# Altium schematic symbol library Controlador_BombaDeAgua(analogico).SCHLIB: 9 symbols
Pins are listed as number, name and electrical type; pins without a type are passive.

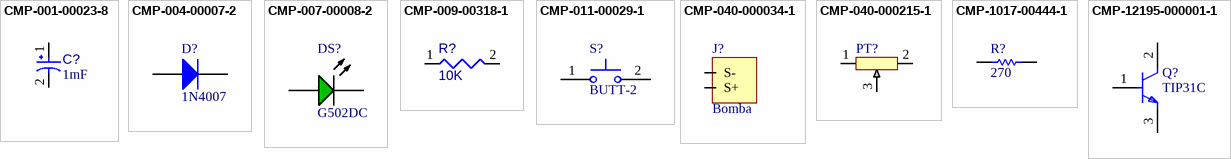
[diagram p0: symbols CMP-001-00023-8 to CMP-12195-000001-1]

## CMP-001-00023-8
designator C?, comment value 1mF  (hidden comment: ECA1EM102)
Aluminum Electrolytic Capacitor, 1000 uF, +/- 20%, 25 V, -40 to 85 degC, 2-Pin THD, RoHS, Bulk; Manufacturer: Panasonic; Manufacturer: Panasonic / Panasonic ECG; Manufacturer Part Number: ECA-1EM102; Ripple Current: 850mA; Voltage Rating: 25V; Lead Pitch: 5mm; Datasheet URL: https://industrial.panasonic.com/cdbs/www-data/pdf/RDF0000/ABA0000C1218.pdf; Packaging: Bulk; Package Reference: CAPPR65-500-2000X1000X2200; Package Description: 2-Pin Radial Lead, Dia 10 mm, Height 22 mm; Diameter: 10mm; Min Operating Temperature: -40°C; Datasheet Version: Rev. 05, 10/2016; RoHS Compliant: True; Capacitor Type: Electrolytic; Tolerance: 20%; Mounting Technology: TH; Manufacturer URL: http://www.panasonic.com/; Max Operating Temperature: 85°C; Package Quantity: 200; Case/Package: Radial; Component Type: Capacitors
footprint CAPPR65-500-2000X1000X2200 (THD, 2-Leads, Dia 10mm, Pin Spacing 5mm)
pins: 1, 2

## CMP-004-00007-2
designator D?, comment 1N4007
General Purpose Rectifier, 1.1 V, 1.0 A, -55 to 175 degC, 2-Pin DO-41, RoHS, Tape and Reel; Manufacturer: Fairchild; Manufacturer: Diodes Inc.; Manufacturer Part Number: 1N4007-T; Peak Reverse Current: 5uA; Max Surge Current: 30A; Elements: 1; Forward Voltage: 1.1V; Package Version: Rev. 2, 09/2008; Forward Current: 1A; Package Quantity: 5000; Packaging: TapeandReel; Package URL: http://www.fairchildsemi.com/dwg/DO/DO41A.pdf; Manufacturer URL: https://www.fairchildsemi.com/; Package Reference: DO-41-2; Pins: 2; Min Operating Temperature: -55°C; Datasheet Version: Rev. 1.1.0, 11/2014; Max Operating Temperature: 175°C; RoHS Compliant: True; Case/Package: DO-41-2; Mounting Technology: TH; Package Description: 2-Pin Axial Lead, Dia 2.375 mm, Body Length 4.63 mm; Datasheet URL: https://www.fairchildsemi.com/datasheets/1N/1N4007.pdf; Component Type: Diodes
footprint FAIR-DO-41-2 (THD, 2-Leads, Body 5.2x2.72mm, Pin Spacing 7.8mm)
pins: 1 K, 2 A

## CMP-007-00008-2
designator DS?, comment G502DC
Green LED, 80 mW, 20 mA, -25 to 85 degC, 2-Pin THD; Manufacturer: Shenzhen CGX; Mounting Technology: TH; Package Reference: G502DC; Datasheet Version: Sep-14; Manufacturer URL: http://szcgx.com/; Package Description: 2-Pin Through Hole Device, Dia 5.9 mm; Datasheet URL: http://datasheet.octopart.com/G502DC-Chengguangxing-datasheet-62330340.pdf; Case/Package: G502DC; RoHS Compliant: Unknown; Component Type: LED
footprint CGX-G502DC (THD, 2-Leads, Dia 5.9mm, Pin Spacing 2.54mm)
pins: 1 A, 2 K

## CMP-009-00318-1
designator R?, comment 10K
Chip Resistor, 10 KOhm, +/- 1%, 0.25 W, -55 to 155 degC, 1206 (3216 Metric); Power: 250mW; Voltage Rating: 200V; Available Preview Images: 2D; RoHS Compliant: True; Pins: 2; Min Operating Temperature: -55°C; Max Operating Temperature: 155°C; Case/Package: 1206; Value: 10k; Tolerance: 1%; Mounting Technology: SM; Source: Components - 14.12.25 - 13.59.SchLib; Design Item ID: CMP-009-00016-5; Component Type: Resistors
footprint RESC0805(2012)_L (Chip Resistor, Body 2.0x1.3mm, IPC High Density)
footprint RESC3216X60X45ML15T20 (Chip Resistor, 2-Leads, Body 3.3x1.75mm, IPC Low Density)
footprint RESC3216X60X45LL15T20 (Chip Resistor, 2-Leads, Body 3.3x1.75mm, IPC High Density)
footprint RESC3216X60X45NL15T20 (Chip Resistor, 2-Leads, Body 3.3x1.75mm, IPC Medium Density)
pins: 1, 2
1 alternate drawing of the same symbol

## CMP-011-00029-1
designator S?, comment BUTT-2
Tactile Switches MINI PUSH BUTTON SWITCH 2-PIN QTY. 4; MF: Gravitech; Case/Package: None; Check_prices: https://www.snapeda.com/parts/BUTT-2/Gravitech/view-part/?ref=eda; Availability: In Stock; SnapEDA_Link: https://www.snapeda.com/parts/BUTT-2/Gravitech/view-part/?ref=snap; MP: BUTT-2; Source: BUTT-2.SchLib; Purchase-URL: https://pricing.snapeda.com/search/part/BUTT-2/?ref=eda; Component Type: Standard; Pins: 2; Value: *; Design Item ID: BUTT-2; Price: None; Component Type: Switches
footprint SW_BUTT-2
pins: 1, 2

## CMP-040-000034-1
designator J?, comment Bomba
Design Item ID: Header 2; Source: FIFILIB.SchLib
footprint Header 2
pins: 0 S+, 1 S-

## CMP-040-000215-1
designator PT?, comment Potenciômetro  (value not drawn)
Design Item ID: Potenciômetro; Source: TROIA2.2.SchLib
footprint Potenciômetro 10K
pins: 1 6, 2 7, 3 8

## CMP-1017-00444-1
designator R?, comment 270
270R 0.75W 1% 2010 (5025 Metric)  SMD; Value: 270.00 Ohm; Case-EIA: 2010; Case-Metric: 5025; Power: 0.75 W; Technology: SMT; Tolerance: 1 %
footprint RESC2010(5025)_M (Chip Resistor, Body 5.0x2.5mm, IPC Low Density)
footprint RESC2010(5025)_N (Chip Resistor, Body 5.0x2.5mm, IPC Medium Density)
footprint RESC2010(5025)_L (Chip Resistor, Body 5.0x2.5mm, IPC High Density)
pins: 1, 2
1 alternate drawing of the same symbol

## CMP-12195-000001-1
designator Q?, comment TIP31C
TRANS NPN 100V 3A TO-220; Manufacturer: STMicroelectronics; Hfe Max: 50; Number Of Npn: 1; Max Junction Temp: +150°C; Standoff Height: 3.5mm; Emitter Base Voltage: 5V; Collector Emitter Saturation Voltage: 1.2V; Power Dissipation: 2W; Hfe Testvce: 4V; Hfe Min: 10; Device Class L2: Transistors; ComponentLink2URL: https://www.st.com/resource/en/datasheet/tip31c.pdf; Device Class L1: Discrete Semiconductors; Digikey Description: TRANS NPN 100V 3A TO-220; Max Collector Current: 3A; RoHS: TRUE; Height: 19.68mm; Mouser Description: Bipolar Transistors - BJT NPN Gen Pur Power; Number Of Elements: 1; Package: TO-220-P0A0015988; Temperature: to +150°C; Octopart: https://octopart.com/tip31c-stmicroelectronics-15555; Manufacturer Part Number: TIP31C; Category: Trans; Hfe Testic: 3A; Lead Free: Yes; Collector Base Voltage: 100V; Device Class L3: BJTs; Collector Emitter Voltage: 100V; Automotive: No; ComponentLink2Description: Datasheet; Temperature Range High: +150°C
footprint FP-TO-220-P0A0015988-MFG
pins: 1 B, 2 C, 3 E